# Altium schematic symbol library MCP2515.SCHLIB: 1 symbol
Pins are listed as number, name and electrical type; pins without a type are passive.

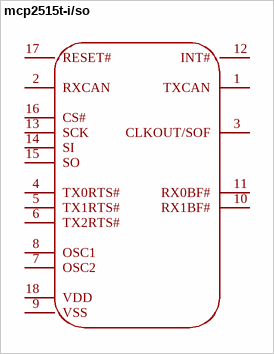
[diagram p0: symbol mcp2515t-i/so]

## mcp2515t-i/so
designator U??  (value not drawn)
MCP2515是一款独立的CAN控制器，支持CAN V2.0B协议，数据传输速率为1 Mbps。它通过SPI接口与MCU通信。; Manufacturer: MICROCHIP(美国微芯); AddInBom: yes; ModelId: 591e416e62784c3bb8a96e1097595c87; ModelName: SOIC-18_L11.6-W7.5-H2.7-LS10.3-P1.27; ModelTransform: 456.692,409.68154,0,0,0,0,0,0,0; Data Rate: 1Mbps; Current - Supply: 5mA; Voltage - Supply: 2.7V~5.5V; Quiescent Supply Current: 1uA; Protocol: SPI; Symbol: MCP2515T-I/SO; LCSC Part Name: 独立CAN控制器带SPI接口; SupplierPart: C153782; ManufacturerPart: MCP2515T-I/SO; Supplier Footprint: SOIC-18-300mil; JLCPCB Part Class: Extended Part; Datasheet: https://item.szlcsc.com/datasheet/MCP2515T-I%252FSO/165124.html; Supplier: LCSC; ConvertToPcb: yes; FootprintName: SOIC-18_L11.6-W7.5-P1.27-LS10.3-BL; Type: CAN控制器; Operating Temperature: -40℃~+85℃; Features: 可编程位时序；单次发送模式；低功耗模式
footprint SOIC-18_L11.6-W7.5-P1.27-LS10.3-BL
pins: 1 TXCAN, 2 RXCAN, 3 CLKOUT/SOF, 4 TX0RTS#, 5 TX1RTS#, 6 TX2RTS#, 7 OSC2, 8 OSC1, 9 VSS, 10 RX1BF#, 11 RX0BF#, 12 INT#, 13 SCK, 14 SI, 15 SO, 16 CS#, 17 RESET#, 18 VDD